# Altium footprint library InductorPower3A.PcbLib: 1 footprints
Each footprint in its own frame and in the unit in brackets; x right, y up, seen from the top. Pads: shape width x height; smd on the part's side, far side on the other; paste and mask are expansions set on the pad; w line width, h text height; cw(c..) or ccw(c..) is an arc to the next point about the centre after c.
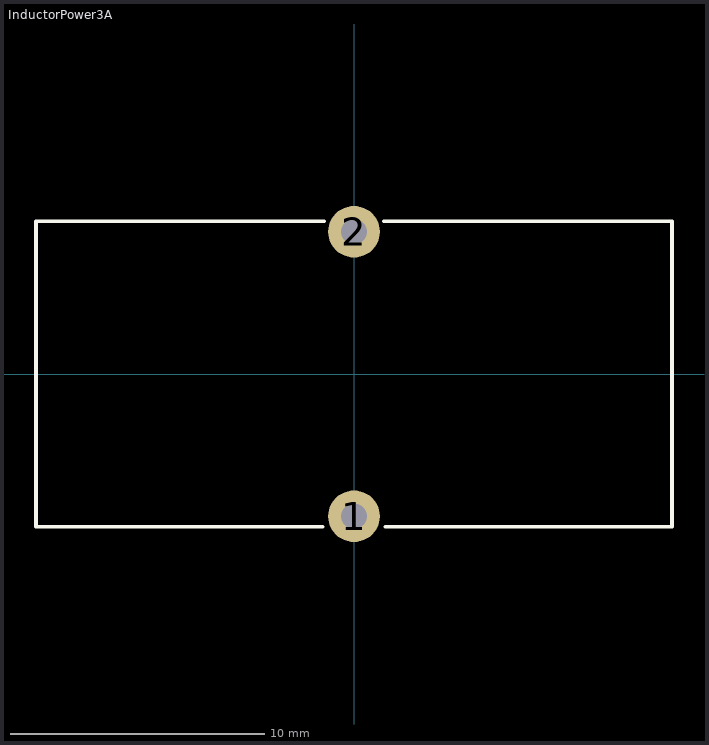
[diagram p0: the footprint, top view; thin cyan lines are the x and y axes]

## InductorPower3A [mil] "InductorPower3A"
pads (2):
  round 80 hole 40: 1(0,-220) 2(0,220)
Top Overlay:
  lines w6: -48.78,-236.22 -492.13,-236.22 -492.13,236.22 -46.22,236.22 ; 46.22,236.22 492.13,236.22 492.13,-236.22 48.78,-236.22
3D body "InductorPower3A.stp": height 992.04, standoff -373.43, extent -492.04,-236.22 492.04,236.22